# Altium footprint library header.PcbLib: 139 footprints (part 6 of 9)
Each footprint in its own frame and in the unit in brackets; x right, y up, seen from the top. Pads: shape width x height; smd on the part's side, far side on the other; paste and mask are expansions set on the pad; w line width, h text height; cw(c..) or ccw(c..) is an arc to the next point about the centre after c.
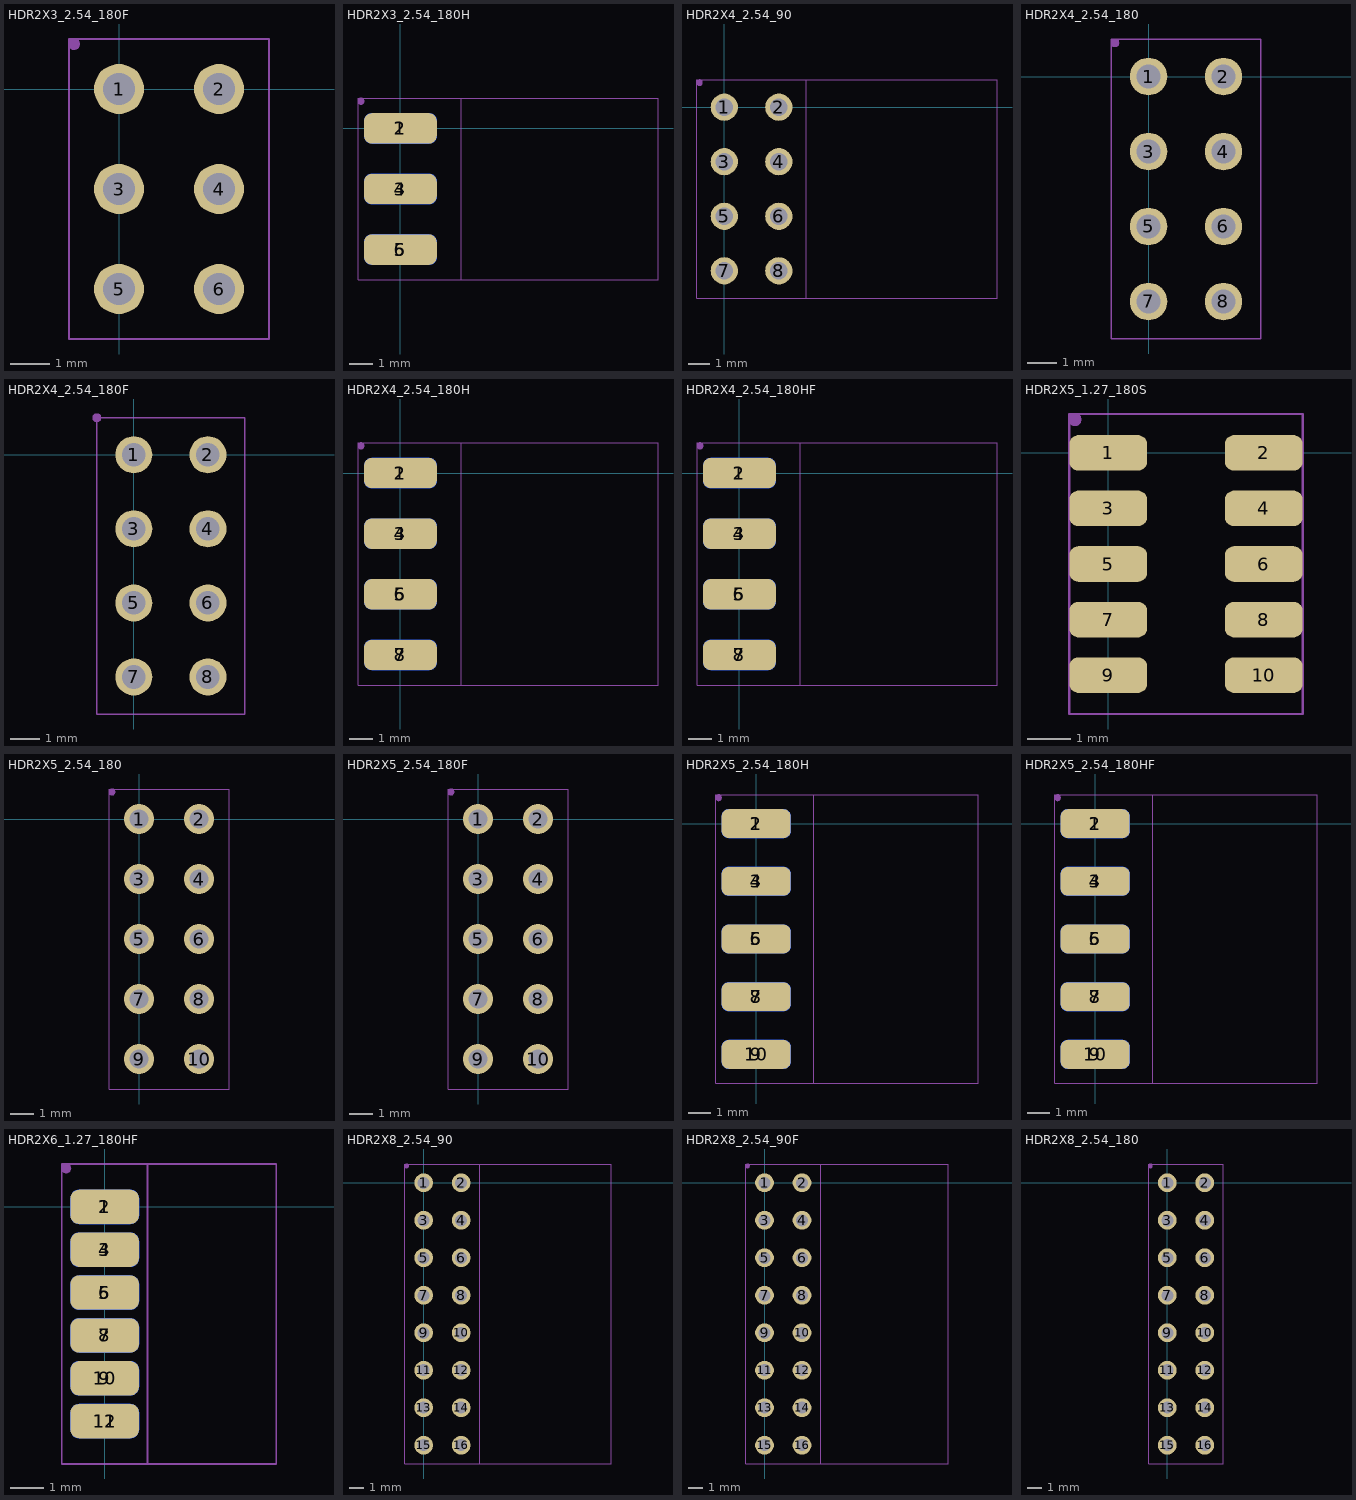
[diagram p5: the footprints below, top view; thin cyan lines are the x and y axes]

## HDR2X3_2.54_180F [mil]
height 169.29
pads (6):
  round 50 hole 32: 1(0,0) 2(100,0) 3(0,-100) 4(100,-100) 5(0,-200) 6(100,-200)
Mechanical 13:
  lines w2: -50,-250 -50,50 150,50 150,-250 -50,-250
Top Component (Mech14):
  circle w2: c-45,45 r5
  region: -45,40 -45.99,40 -47.83,40.76 -49.24,42.17 -50,44.01 -50,45 -50,45.99 -49.24,47.83 -47.83,49.24 -45.99,50 -45,50 -44.01,50 -42.17,49.24 -40.76,47.83 -40,45.99 -40,45 -40,44.01 -40.76,42.17 -42.17,40.76 -44.01,40
  lines w2: -50,-250 -50,50 150,50 150,-250 -50,-250
  text ".Designator" at 19,-120 h80
3D body "female_header_a-bl254-dg-g06d.stp": height 334.65, standoff -125.98, extent -48.42,-254.91 148.43,54.92

## HDR2X3_2.54_180H [mil]
height 169.29
pads (6):
  rrect50% 120x50 smd: 1(0,0) 3(0,-100) 5(0,-200)
  rrect50% 120x50 smd far side: 2(0,0) 4(0,-100) 6(0,-200)
Mechanical 13:
  lines w2: -70,-250 425,-250 425,50 -70,50 -70,-250
Top Component (Mech14):
  circle w2: c-65,45 r5
  region: -65,40 -65.99,40 -67.83,40.76 -69.24,42.17 -70,44.01 -70,45 -70,45.99 -69.24,47.83 -67.83,49.24 -65.99,50 -65,50 -64.01,50 -62.17,49.24 -60.76,47.83 -60,45.99 -60,45 -60,44.01 -60.76,42.17 -62.17,40.76 -64.01,40
  lines w2: -70,-250 100,-250 100,50 -70,50 -70,-250
  text ".Designator" at -31,-120 h80
Bottom Component (Mech15):
  lines w2: -70,-250 100,-250 100,50 -70,50 -70,-250
3D body "pin_header_awl254-dg-g06d.stp": height 78, standoff -122, extent -38.11,-249.99 414.65,50.01

## HDR2X4_2.54_90 [mil]
height 169.29
pads (8):
  round 50 hole 32: 1(0,0) 2(100,0) 3(0,-100) 4(100,-100) 5(0,-200) 6(100,-200) 7(0,-300) 8(100,-300)
Mechanical 13:
  lines w2: -50,-350 -50,50 500,50 500,-350 -50,-350
Top Component (Mech14):
  circle w2: c-45,45 r5
  region: -45,40 -45.99,40 -47.83,40.76 -49.24,42.17 -50,44.01 -50,45 -50,45.99 -49.24,47.83 -47.83,49.24 -45.99,50 -45,50 -44.01,50 -42.17,49.24 -40.76,47.83 -40,45.99 -40,45 -40,44.01 -40.76,42.17 -42.17,40.76 -44.01,40
  lines w2: -50,-350 -50,50 150,50 150,-350 -50,-350
  text ".Designator" at 19,-170 h80
3D body "pin_header_awl254-da-g08d.stp": height 198.43, standoff -116.54, extent -12.44,-349.99 494.65,50.01

## HDR2X4_2.54_180 [mil]
height 169.29
pads (8):
  round 50 hole 32: 1(0,0) 2(100,0) 3(0,-100) 4(100,-100) 5(0,-200) 6(100,-200) 7(0,-300) 8(100,-300)
Mechanical 13:
  lines w2: -50,-350 -50,50 150,50 150,-350 -50,-350
Top Component (Mech14):
  circle w2: c-45,45 r5
  region: -45,40 -45.99,40 -47.83,40.76 -49.24,42.17 -50,44.01 -50,45 -50,45.99 -49.24,47.83 -47.83,49.24 -45.99,50 -45,50 -44.01,50 -42.17,49.24 -40.76,47.83 -40,45.99 -40,45 -40,44.01 -40.76,42.17 -42.17,40.76 -44.01,40
  lines w2: -50,-350 -50,50 150,50 150,-350 -50,-350
  text ".Designator" at 19,-170 h80
3D body "pin_header_awl254-dg-g08d.stp": height 334.65, standoff -118.11, extent -50,-349.99 150,50.01

## HDR2X4_2.54_180F [mil]
height 169.29
pads (8):
  round 50 hole 32: 1(0,0) 2(100,0) 3(0,-100) 4(100,-100) 5(0,-200) 6(100,-200) 7(0,-300) 8(100,-300)
Mechanical 13:
  lines w2: -50,-350 -50,50 150,50 150,-350 -50,-350
Top Component (Mech14):
  circle w2: c-50,50 r5
  region: -50,45 -50.99,45 -52.83,45.76 -54.24,47.17 -55,49.01 -55,50 -55,50.99 -54.24,52.83 -52.83,54.24 -50.99,55 -50,55 -49.01,55 -47.17,54.24 -45.76,52.83 -45,50.99 -45,50 -45,49.01 -45.76,47.17 -47.17,45.76 -49.01,45
  lines w2: -50,-350 -50,50 150,50 150,-350 -50,-350
  text ".Designator" at 19,-170 h80
3D body "female_header_a-bl254-dg-g08d.stp": height 334.65, standoff -125.98, extent -48.42,-354.92 148.43,54.93

## HDR2X4_2.54_180H [mil]
height 169.29
pads (8):
  rrect50% 120x50 smd: 1(0,0) 3(0,-100) 5(0,-200) 7(0,-300)
  rrect50% 120x50 smd far side: 2(0,0) 4(0,-100) 6(0,-200) 8(0,-300)
Mechanical 13:
  lines w2: -70,-350 -70,50 425,50 425,-350 -70,-350
Top Component (Mech14):
  circle w2: c-65,45 r5
  region: -65,40 -65.99,40 -67.83,40.76 -69.24,42.17 -70,44.01 -70,45 -70,45.99 -69.24,47.83 -67.83,49.24 -65.99,50 -65,50 -64.01,50 -62.17,49.24 -60.76,47.83 -60,45.99 -60,45 -60,44.01 -60.76,42.17 -62.17,40.76 -64.01,40
  lines w2: -70,-350 -70,50 100,50 100,-350 -70,-350
  text ".Designator" at -31,-170 h80
Bottom Component (Mech15):
  lines w2: -70,-350 -70,50 100,50 100,-350 -70,-350
3D body "pin_header_awl254-dg-g08d.stp": height 78, standoff -122, extent -38.11,-350 414.64,50

## HDR2X4_2.54_180HF [mil]
height 169.29
pads (8):
  rrect50% 120x50 smd: 1(0,0) 3(0,-100) 5(0,-200) 7(0,-300)
  rrect50% 120x50 smd far side: 2(0,0) 4(0,-100) 6(0,-200) 8(0,-300)
Mechanical 13:
  lines w2: -70,-350 -70,50 425,50 425,-350 -70,-350
Top Component (Mech14):
  circle w2: c-65,45 r5
  region: -65,40 -65.99,40 -67.83,40.76 -69.24,42.17 -70,44.01 -70,45 -70,45.99 -69.24,47.83 -67.83,49.24 -65.99,50 -65,50 -64.01,50 -62.17,49.24 -60.76,47.83 -60,45.99 -60,45 -60,44.01 -60.76,42.17 -62.17,40.76 -64.01,40
  lines w2: -70,-350 -70,50 100,50 100,-350 -70,-350
  text ".Designator" at -31,-170 h80
Bottom Component (Mech15):
  lines w2: -70,-350 -70,50 100,50 100,-350 -70,-350
3D body "female_header_a-bl254-dg-g08d.stp": height 76.43, standoff -120.43, extent -35.98,-354.92 424.65,54.92

## HDR2X5_1.27_180S [mil]
height 169.29
pads (10):
  rrect50% 70x32 smd: 1(0,0) 2(140,0) 3(0,-50) 4(140,-50) 5(0,-100) 6(140,-100) 7(0,-150) 8(140,-150) 9(0,-200) 10(140,-200)
Mechanical 13:
  lines w2: -35,-235 175,-235 175,35 -35,35 -35,-235
Top Component (Mech14):
  circle w2: c-30,30 r5
  region: -30,25 -30.99,25 -32.83,25.76 -34.24,27.17 -35,29.01 -35,30 -35,30.99 -34.24,32.83 -32.83,34.24 -30.99,35 -30,35 -29.01,35 -27.17,34.24 -25.76,32.83 -25,30.99 -25,30 -25,29.01 -25.76,27.17 -27.17,25.76 -29.01,25
  lines w2: -35,-235 175,-235 175,35 -35,35 -35,-235
  text ".Designator" at 44,-120 h80
3D body "pin_header_a-sl127-dg-g10mp1.stp": height 252.13, standoff 0.25, extent -38.36,-224.99 178.34,25.01

## HDR2X5_2.54_180 [mil]
height 169.29
pads (10):
  round 50 hole 32: 1(0,0) 2(100,0) 3(0,-100) 4(100,-100) 5(0,-200) 6(100,-200) 7(0,-300) 8(100,-300) 9(0,-400) 10(100,-400)
Mechanical 13:
  lines w2: -50,-450 150,-450 150,50 -50,50 -50,-450
Top Component (Mech14):
  circle w2: c-45,45 r5
  region: -45,40 -45.99,40 -47.83,40.76 -49.24,42.17 -50,44.01 -50,45 -50,45.99 -49.24,47.83 -47.83,49.24 -45.99,50 -45,50 -44.01,50 -42.17,49.24 -40.76,47.83 -40,45.99 -40,45 -40,44.01 -40.76,42.17 -42.17,40.76 -44.01,40
  lines w2: -50,-450 -50,50 150,50 150,-450 -50,-450
  text ".Designator" at 19,-220 h80
3D body "pin_header_awl254-dg-g10d.stp": height 334.65, standoff -118.11, extent -50,-450 150,50

## HDR2X5_2.54_180F [mil]
height 169.29
pads (10):
  round 50 hole 32: 1(0,0) 2(100,0) 3(0,-100) 4(100,-100) 5(0,-200) 6(100,-200) 7(0,-300) 8(100,-300) 9(0,-400) 10(100,-400)
Mechanical 13:
  lines w2: -50,-450 150,-450 150,50 -50,50 -50,-450
Top Component (Mech14):
  circle w2: c-45,45 r5
  region: -45,40 -45.99,40 -47.83,40.76 -49.24,42.17 -50,44.01 -50,45 -50,45.99 -49.24,47.83 -47.83,49.24 -45.99,50 -45,50 -44.01,50 -42.17,49.24 -40.76,47.83 -40,45.99 -40,45 -40,44.01 -40.76,42.17 -42.17,40.76 -44.01,40
  lines w2: -50,-450 150,-450 150,50 -50,50 -50,-450
  text ".Designator" at 19,-220 h80
3D body "female_header_a-bl254-dg-g10d.stp": height 334.65, standoff -125.98, extent -48.43,-454.92 148.42,54.92

## HDR2X5_2.54_180H [mil]
height 169.29
pads (10):
  rrect50% 120x50 smd: 1(0,0) 3(0,-100) 5(0,-200) 7(0,-300) 9(0,-400)
  rrect50% 120x50 smd far side: 2(0,0) 4(0,-100) 6(0,-200) 8(0,-300) 10(0,-400)
Mechanical 13:
  lines w2: -70,-450 385,-450 385,50 -70,50 -70,-450
Top Component (Mech14):
  circle w2: c-65,45 r5
  region: -65,40 -65.99,40 -67.83,40.76 -69.24,42.17 -70,44.01 -70,45 -70,45.99 -69.24,47.83 -67.83,49.24 -65.99,50 -65,50 -64.01,50 -62.17,49.24 -60.76,47.83 -60,45.99 -60,45 -60,44.01 -60.76,42.17 -62.17,40.76 -64.01,40
  lines w2: -70,-450 100,-450 100,50 -70,50 -70,-450
  text ".Designator" at -30,-221 h80
Bottom Component (Mech15):
  lines w2: -70,-450 -70,50 100,50 100,-450 -70,-450
3D body "pin_header_awl254-dg-g10d.stp": height 100, standoff -100, extent -68.11,-449.99 384.65,50.01

## HDR2X5_2.54_180HF [mil]
height 169.29
pads (10):
  rrect50% 120x50 smd: 1(0,0) 3(0,-100) 5(0,-200) 7(0,-300) 9(0,-400)
  rrect50% 120x50 smd far side: 2(0,0) 4(0,-100) 6(0,-200) 8(0,-300) 10(0,-400)
Mechanical 13:
  lines w2: -70,-450 -70,50 385,50 385,-450 -70,-450
Top Component (Mech14):
  circle w2: c-65,45 r5
  region: -65,40 -65.99,40 -67.83,40.76 -69.24,42.17 -70,44.01 -70,45 -70,45.99 -69.24,47.83 -67.83,49.24 -65.99,50 -65,50 -64.01,50 -62.17,49.24 -60.76,47.83 -60,45.99 -60,45 -60,44.01 -60.76,42.17 -62.17,40.76 -64.01,40
  lines w2: -70,-450 -70,50 100,50 100,-450 -70,-450
  text ".Designator" at -30,-221 h80
Bottom Component (Mech15):
  lines w2: -70,-450 100,-450 100,50 -70,50 -70,-450
3D body "female_header_a-bl254-dg-g10d.stp": height 98.43, standoff -98.43, extent -75.98,-454.93 384.65,54.92

## HDR2X6_1.27_180HF [mil]
height 169.29
pads (12):
  rrect50% 80x40 smd: 1(0,0) 3(0,-50) 5(0,-100) 7(0,-150) 9(0,-200) 11(0,-250)
  rrect50% 80x40 smd far side: 2(0,0) 4(0,-50) 6(0,-100) 8(0,-150) 10(0,-200) 12(0,-250)
Mechanical 13:
  lines w2: -50,-300 200,-300 200,50 -50,50 -50,-300
Top Component (Mech14):
  circle w2: c-45,45 r5
  region: -45,40 -45.99,40 -47.83,40.76 -49.24,42.17 -50,44.01 -50,45 -50,45.99 -49.24,47.83 -47.83,49.24 -45.99,50 -45,50 -44.01,50 -42.17,49.24 -40.76,47.83 -40,45.99 -40,45 -40,44.01 -40.76,42.17 -42.17,40.76 -44.01,40
  lines w2: -50,-300 50,-300 50,50 -50,50 -50,-300
  text ".Designator" at -31,-145 h80
3D body "female_header_a-bl127-dg-g12d.stp": height 39.02, standoff -83.02, extent -28.35,-282.88 200,32.88

## HDR2X8_2.54_90 [mil]
height 169.29
pads (16):
  round 50 hole 32: 1(0,0) 2(100,0) 3(0,-100) 4(100,-100) 5(0,-200) 6(100,-200) 7(0,-300) 8(100,-300) 9(0,-400) 10(100,-400) 11(0,-500) 12(100,-500) 13(0,-600) 14(100,-600) 15(0,-700) 16(100,-700)
Mechanical 13:
  lines w2: -50,-750 500,-750 500,50 -50,50 -50,-750
Top Component (Mech14):
  circle w2: c-45,45 r5
  region: -45,40 -45.99,40 -47.83,40.76 -49.24,42.17 -50,44.01 -50,45 -50,45.99 -49.24,47.83 -47.83,49.24 -45.99,50 -45,50 -44.01,50 -42.17,49.24 -40.76,47.83 -40,45.99 -40,45 -40,44.01 -40.76,42.17 -42.17,40.76 -44.01,40
  lines w2: -50,-750 150,-750 150,50 -50,50 -50,-750
  text ".Designator" at 19,-370 h80
3D body "pin_header_awl254-da-g16d.stp": height 198.43, standoff -116.54, extent -10,-750 497.09,50

## HDR2X8_2.54_90F [mil]
height 169.29
pads (16):
  round 50 hole 32: 1(0,0) 2(100,0) 3(0,-100) 4(100,-100) 5(0,-200) 6(100,-200) 7(0,-300) 8(100,-300) 9(0,-400) 10(100,-400) 11(0,-500) 12(100,-500) 13(0,-600) 14(100,-600) 15(0,-700) 16(100,-700)
Mechanical 13:
  lines w2: -50,-750 490,-750 490,50 -50,50 -50,-750
Top Component (Mech14):
  circle w2: c-45,45 r5
  region: -45,40 -45.99,40 -47.83,40.76 -49.24,42.17 -50,44.01 -50,45 -50,45.99 -49.24,47.83 -47.83,49.24 -45.99,50 -45,50 -44.01,50 -42.17,49.24 -40.76,47.83 -40,45.99 -40,45 -40,44.01 -40.76,42.17 -42.17,40.76 -44.01,40
  lines w2: -50,-750 150,-750 150,50 -50,50 -50,-750
  text ".Designator" at 19,-370 h80
3D body "female_header_a-bl254-da-g16d.stp": height 198.43, standoff -124.41, extent -10,-754.92 486.06,54.92

## HDR2X8_2.54_180 [mil]
height 169.29
pads (16):
  round 50 hole 32: 1(0,0) 2(100,0) 3(0,-100) 4(100,-100) 5(0,-200) 6(100,-200) 7(0,-300) 8(100,-300) 9(0,-400) 10(100,-400) 11(0,-500) 12(100,-500) 13(0,-600) 14(100,-600) 15(0,-700) 16(100,-700)
Mechanical 13:
  lines w2: -50,-750 -50,50 150,50 150,-750 -50,-750
Top Component (Mech14):
  circle w2: c-45,45 r5
  region: -45,40 -45.99,40 -47.83,40.76 -49.24,42.17 -50,44.01 -50,45 -50,45.99 -49.24,47.83 -47.83,49.24 -45.99,50 -45,50 -44.01,50 -42.17,49.24 -40.76,47.83 -40,45.99 -40,45 -40,44.01 -40.76,42.17 -42.17,40.76 -44.01,40
  lines w2: -50,-750 -50,50 150,50 150,-750 -50,-750
  text ".Designator" at 19,-370 h80
3D body "pin_header_awl254-dg-g16d.stp": height 334.65, standoff -118.11, extent -50,-749.99 150,50.01